# Altium integrated library CSTNE8M00G55A000R0.IntLib: 1 symbol
Pins are listed as number, name and electrical type; pins without a type are passive.

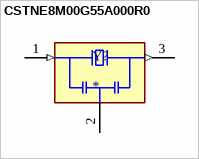
[diagram p0: symbol CSTNE8M00G55A000R0]

## CSTNE8M00G55A000R0
designator Y?
8MHz Ceramic Resonator Built in Capacitor 33pF Â±0.2% 40 Ohms -40Â°C ~ 125Â°C Surface Mount; MF: Murata Electronics North America; MP: CSTNE8M00G55A000R0; Check_prices: https://www.snapeda.com/parts/CSTNE8M00G55A000R0/Murata%20Electronics%20North%20America/view-part/3214339/?ref=eda; Value: *; SnapEDA_Link: https://www.snapeda.com/parts/CSTNE8M00G55A000R0/Murata%20Electronics%20North%20America/view-part/3214339/?ref=snap; Price: None; Availability: Good; Package: SMD-3 Murata; Purchase-URL: https://pricing.snapeda.com/search/part/CSTNE8M00G55A000R0/?ref=eda
footprint OSC_CSTNE8M00G55A000R0
pins: 1 IN (in), 2 GND (power), 3 OUT (out)